# Altium schematic symbol library NTS_Integrated_IC.SchLib: 8 symbols
Pins are listed as number, name and electrical type; pins without a type are passive.

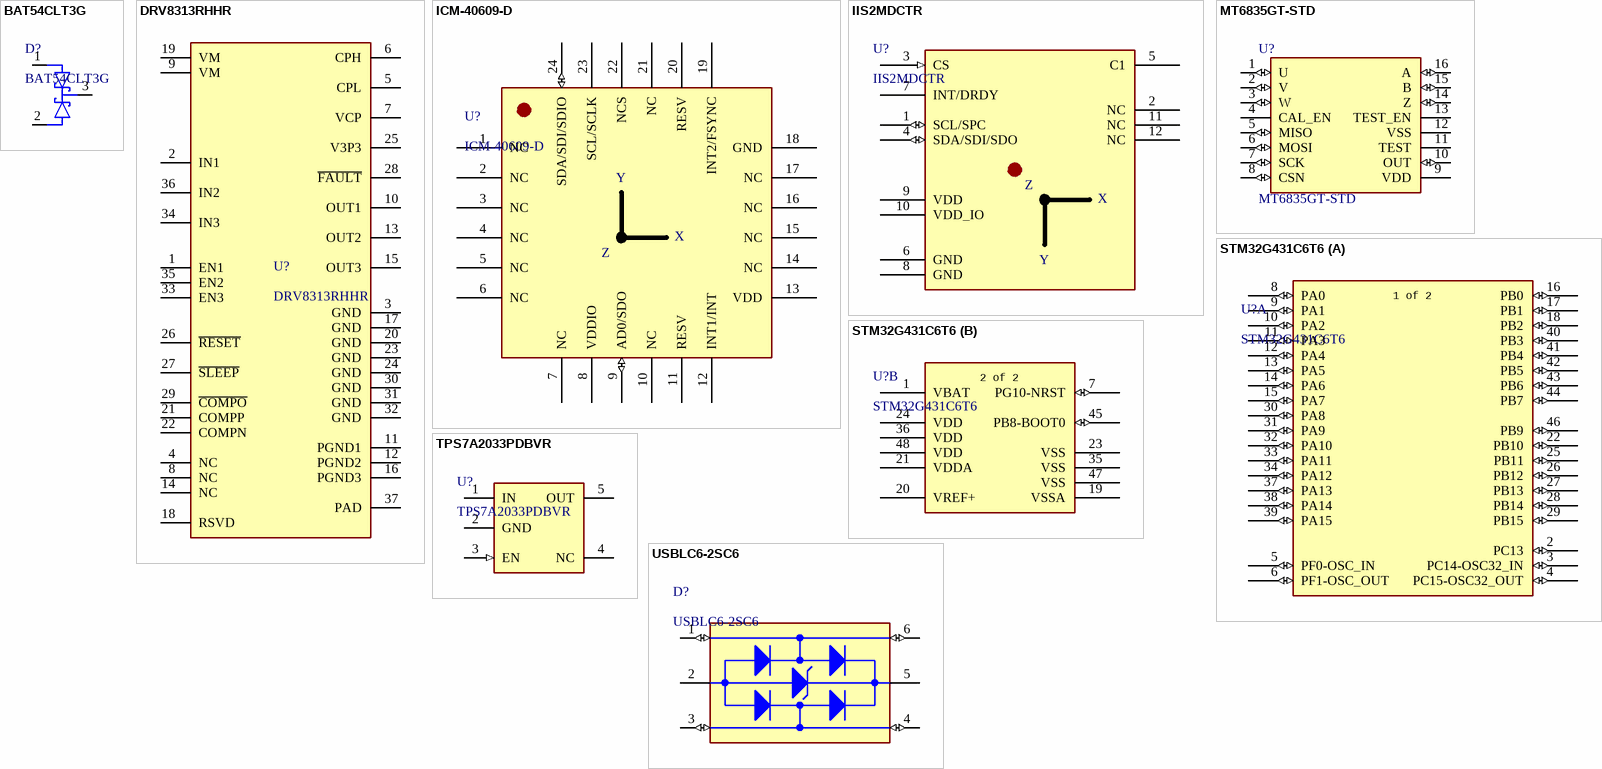
[diagram p0: symbols BAT54CLT3G to USBLC6-2SC6]

## BAT54CLT3G
designator D?
BAT54CL Series 30 V 2 uA Surface Mount Schottky Barrier Diode - SOT-23; Manufacturer: onsemi; Manufacturer Lifecycle Status: ACTIVE; Average Rectified Current: 200mA; Element Configuration: Common Cathode; Forward Voltage: 240mV; Max Forward Surge Current (Ifsm): 600mA; Max Output Current: 100mA; Max Power Dissipation: 225mW; Max Repetitive Reverse Voltage (Vrrm): 30V; Max Reverse Leakage Current: 2µA; Number of Elements: 2; Recovery Time: 5ns; Supplier 1: DigiKey; Manufacturer Part Number: BAT54CLT3G; RoHS: Compliant; Category: Schottky Diodes; Stock 1: 167313; Pricing 1: 1=0.13, 10=0.081, 100=0.0499, 500=0.036, 1000=0.03147, 2000=0.02764, 5000=0.02347 (USD); Case/Package: SOT-23-3; China RoHS: Compliant; Contact Plating: Tin; Forward Current: 200mA; Halogen Free: Halogen Free; Height: 1.01mm; Lead Free: Lead Free; Length: 3.04mm; Lifecycle Status: Production; Max Operating Temperature: 125°C; Max Reverse Voltage (DC): 30V; Max Surge Current: 600mA; Min Operating Temperature: -55°C; Number of Pins: 3; Number of Terminals: 3; Packaging: Tape and Reel; Peak Non-Repetitive Surge Current: 600mA; Radiation Hardening: No; REACH SVHC: Yes; Reverse Recovery Time: 5ns; Schedule B: 8541100070, 8541100070|8541100070|8541100070|8541100070|8541100070; Width: 1.4mm; ComponentLink1URL: https://datasheet.octopart.com:443/BAT54CLT3G-onsemi-datasheet-175423440.pdf?src-supplier=IHS; ComponentLink1Description: https://datasheet.octopart.com:443/BAT54CLT3G-onsemi-datasheet-175423440.pdf?src-supplier=IHS; ComponentLink2URL: https://datasheet.octopart.com:443/BAT54CLT3G-ON-Semiconductor-datasheet-78758876.pdf?src-supplier=JRH+Electronics; ComponentLink2Description: https://datasheet.octopart.com:443/BAT54CLT3G-ON-Semiconductor-datasheet-78758876.pdf?src-supplier=JRH+Electronics; ComponentLink3URL: https://datasheet.octopart.com:443/BAT54CLT3G-ON-Semiconductor-datasheet-141916634.pdf?src-supplier=Upverter; ComponentLink3Description: https://datasheet.octopart.com:443/BAT54CLT3G-ON-Semiconductor-datasheet-141916634.pdf?src-supplier=Upverter; ComponentLink4URL: https://datasheet.octopart.com:443/BAT54CLT3G-ON-Semiconductor-datasheet-8332005.pdf?src-supplier=Future+Electronics; ComponentLink4Description: https://datasheet.octopart.com:443/BAT54CLT3G-ON-Semiconductor-datasheet-8332005.pdf?src-supplier=Future+Electronics; ComponentLink5URL: https://datasheet.octopart.com:443/BAT54CLT3G-ON-Semiconductor-datasheet-8106935.pdf?src-supplier=Future+Electronics; ComponentLink5Description: https://datasheet.octopart.com:443/BAT54CLT3G-ON-Semiconductor-datasheet-8106935.pdf?src-supplier=Future+Electronics; ComponentLink6URL: https://datasheet.octopart.com:443/BAT54CLT3G-ON-Semiconductor-datasheet-41525499.pdf?src-supplier=RS+(Formerly+Allied+Electronics); ComponentLink6Description: https://datasheet.octopart.com:443/BAT54CLT3G-ON-Semiconductor-datasheet-41525499.pdf?src-supplier=RS+(Formerly+Allied+Electronics); ComponentLink7URL: https://datasheet.octopart.com:443/BAT54CLT3G-onsemi-datasheet-189128037.pdf?src-supplier=Master+Electronics; ComponentLink7Description: https://datasheet.octopart.com:443/BAT54CLT3G-onsemi-datasheet-189128037.pdf?src-supplier=Master+Electronics; ComponentLink8URL: https://datasheet.octopart.com:443/BAT54CLT3G-ON-Semiconductor-datasheet-11629545.pdf?src-supplier=Arrow+Electronics; ComponentLink8Description: https://datasheet.octopart.com:443/BAT54CLT3G-ON-Semiconductor-datasheet-11629545.pdf?src-supplier=Arrow+Electronics; ComponentLink9URL: http://sigma.octopart.com:80/15540786/rohs_certificate/ON-Semiconductor-BAT54CLT3G.pdf?src-supplier=Compliance+Statements; ComponentLink9Description: http://sigma.octopart.com:80/15540786/rohs_certificate/ON-Semiconductor-BAT54CLT3G.pdf?src-supplier=Compliance+Statements; ComponentLink10URL: http://sigma.octopart.com:80/15674214/materials_sheet/ON-Semiconductor-BAT54CLT3G.csv?src-supplier=Compliance+Statements; ComponentLink10Description: http://sigma.octopart.com:80/15674214/materials_sheet/ON-Semiconductor-BAT54CLT3G.csv?src-supplier=Compliance+Statements; ComponentLink11URL: http://sigma.octopart.com:80/150604010/rohs_statement/ON-Semiconductor-BAT54CLT3G.pdf?src-supplier=Compliance+Statements; ComponentLink11Description: http://sigma.octopart.com:80/150604010/rohs_statement/ON-Semiconductor-BAT54CLT3G.pdf?src-supplier=Compliance+Statements; ComponentLink12URL: http://sigma.octopart.com:80/reach_statement/ON-Semiconductor-company-79.pdf?src-supplier=Compliance+Statements; ComponentLink12Description: http://sigma.octopart.com:80/reach_statement/ON-Semiconductor-company-79.pdf?src-supplier=Compliance+Statements; ComponentLink13URL: https://octopart.com:443/opatz8j6/c1?t=fWwoKikT5261mXGM0ypy0g0IGQzQcDddsSZuvbSVdmB-1nZSRZ4ggwUKqIc0QYATxiN1QNv3tc5K9gNLWSsypfRmlmmLl0CvTb6IWTPcR-jy4ZtU7iJlv7LHrjajWQE2jihf16JKVcuOV1nA2-N-excMr1_B4nLS4kXG99ZhUnnRORXzXCD22yMfTlIHVWxdWHuIGrDRLRfDN_FEl5iESrFYiOS-fWRa5LxuqDiveXSQWuYMoy0mSfHtN-TtcfG_yO7Nd7kaCwpBKZqOkFRn_ARKtZBKqK2rNXBFzcF_wkdg0CPJ3JBCCd0-fzEpMgisCGH-zXoAjZ7-YzxmcgmCGNIVYquym6vDa-BdygE&src-supplier=Compliance+Statements; ComponentLink13Description: https://octopart.com:443/opatz8j6/c1?t=fWwoKikT5261mXGM0ypy0g0IGQzQcDddsSZuvbSVdmB-1nZSRZ4ggwUKqIc0QYATxiN1QNv3tc5K9gNLWSsypfRmlmmLl0CvTb6IWTPcR-jy4ZtU7iJlv7LHrjajWQE2jihf16JKVcuOV1nA2-N-excMr1_B4nLS4kXG99ZhUnnRORXzXCD22yMfTlIHVWxdWHuIGrDRLRfDN_FEl5iESrFYiOS-fWRa5LxuqDiveXSQWuYMoy0mSfHtN-TtcfG_yO7Nd7kaCwpBKZqOkFRn_ARKtZBKqK2rNXBFzcF_wkdg0CPJ3JBCCd0-fzEpMgisCGH-zXoAjZ7-YzxmcgmCGNIVYquym6vDa-BdygE&src-supplier=Compliance+Statements; ComponentLink14URL: https://octopart.com:443/opatz8j6/c1?t=B_1W9NDPKiVW9_xeBhSjXW6qpRFQt1GubKuBeL6C7KMWiDqOWuxbkOIcp9dqtX3Yq8--5XW88lfGBVA7HmD66DFyQvDNcrrPjWXZiG4711EOeHHnHpPqwc95_S4fQme7yE9n3sYxdAQvxBXSm4yRVJ71c-OpzKpAJ6ywCVT0a0sKLuIcOVcaIgD61fZtF_LS1kcCDjRxNYrL9WJZcGi5NptJxef-JqYkGUKDfcFHMGi1KZqXCgPZbgxa-Fw5LZxpHp3-6aQwXylQzVvUqX6mobR1Vl3H8PpiMaQjr6OwzEQ9egeKJpLqUcsu08VRy-SY_uHfFQyy3GilZ_cbGYiHirfBU5Mi5EnID-Ym-OKf&src-supplier=Compliance+Statements; ComponentLink14Description: https://octopart.com:443/opatz8j6/c1?t=B_1W9NDPKiVW9_xeBhSjXW6qpRFQt1GubKuBeL6C7KMWiDqOWuxbkOIcp9dqtX3Yq8--5XW88lfGBVA7HmD66DFyQvDNcrrPjWXZiG4711EOeHHnHpPqwc95_S4fQme7yE9n3sYxdAQvxBXSm4yRVJ71c-OpzKpAJ6ywCVT0a0sKLuIcOVcaIgD61fZtF_LS1kcCDjRxNYrL9WJZcGi5NptJxef-JqYkGUKDfcFHMGi1KZqXCgPZbgxa-Fw5LZxpHp3-6aQwXylQzVvUqX6mobR1Vl3H8PpiMaQjr6OwzEQ9egeKJpLqUcsu08VRy-SY_uHfFQyy3GilZ_cbGYiHirfBU5Mi5EnID-Ym-OKf&src-supplier=Compliance+Statements; Supplier Part Number 1: BAT54CLT3GOSDKR-ND
footprint ONSC-SOT-23-3-318-08_V (SOT23, 3-Leads, Body 2.92x1.3mm, Pitch 0.95mm)
pins: 1 A1, 2 A2, 3 K

## DRV8313RHHR
designator U?
65-V max 3-A peak 3-phase motor driver with integrated FETs 36-VQFN -40 to 125; Manufacturer_Name: Texas Instruments; TYPE: TYPE; RefDes: RefDes; Copyright: Copyright (C) 2026 Ultra Librarian. All rights reserved.; Manufacturer_Part_Number: DRV8313RHHR
footprint QFN50P600X600X90-37N
pins: 1 EN1, 2 IN1, 3 GND, 4 NC, 5 CPL, 6 CPH, 7 VCP, 8 NC, 9 VM, 10 OUT1, 11 PGND1, 12 PGND2, 13 OUT2, 14 NC, 15 OUT3, 16 PGND3, 17 GND, 18 RSVD, 19 VM, 20 GND, 21 COMPP, 22 COMPN, 23 GND, 24 GND, 25 V3P3, 26 ~{RESET}, 27 ~{SLEEP}, 28 ~{FAULT}, 29 ~{COMPO}, 30 GND, 31 GND, 32 GND, 33 EN3, 34 IN3, 35 EN2, 36 IN2, 37 PAD

## ICM-40609-D
designator U?
IMU (Inertial Measurement Unit), 6-Axis, Accelerometer, Gyroscope; Manufacturer: TDK; Manufacturer Lifecycle Status: PRODUCTION; Supplier 1: DigiKey; Manufacturer Part Number: ICM-40609-D; RoHS: Compliant; Category: Sensors; Stock 1: 4348; Pricing 1: 5000=3.0875 (USD); Introduction Date: 2023-02-15; Length: 3mm; Lifecycle Status: Production; REACH SVHC: Yes; Width: 3mm; ComponentLink1URL: https://datasheet.octopart.com:443/ICM-40609-D-TDK-datasheet-168053012.pdf?src-supplier=TDK; ComponentLink1Description: https://datasheet.octopart.com:443/ICM-40609-D-TDK-datasheet-168053012.pdf?src-supplier=TDK; ComponentLink2URL: https://datasheet.octopart.com:443/ICM-40609-D-TDK-datasheet-178640640.pdf?src-supplier=Farnell; ComponentLink2Description: https://datasheet.octopart.com:443/ICM-40609-D-TDK-datasheet-178640640.pdf?src-supplier=Farnell; Supplier Part Number 1: 1428-ICM-40609-DTR-ND
footprint XDCR_ICM-40609-D
pins: 1 NC, 2 NC, 3 NC, 4 NC, 5 NC, 6 NC, 7 NC, 8 VDDIO (power), 9 AD0/SDO (io), 10 NC, 11 RESV, 12 INT1/INT, 13 VDD (power), 14 NC, 15 NC, 16 NC, 17 NC, 18 GND (power), 19 INT2/FSYNC, 20 RESV, 21 NC, 22 NCS, 23 SCL/SCLK, 24 SDA/SDI/SDIO (io)
text: Y; X; Z

## IIS2MDCTR
designator U?
IIS2MDC Series 3.6 V Ultra-Low-Power 3-axis Digital Magnetic Sensor - LGA-12; Manufacturer: STMicroelectronics; Manufacturer Package Identifier: LGA-12-DM00170568; Axis: X, Y, Z; Max Supply Voltage: 3.6V; Min Supply Voltage: 1.71V; Number of Circuits: 1; Operating Supply Voltage: 2.5V; Sensing Method: Magnetoresistive; Supplier 1: DigiKey; Manufacturer Part Number: IIS2MDCTR; RoHS: Compliant; Category: Hall Effect Sensors; Stock 1: 4818; Pricing 1: 1=3.25, 5=2.9, 10=2.77, 25=2.6136, 50=2.507, 100=2.4091, 500=2.21248, 1000=2.13927, 5000=1.99179 (USD); China RoHS: Compliant; Height: 700µm; Height - Seated (Max): 700µm; Length: 2mm; Lifecycle Status: Production; Max Operating Temperature: 85°C; Min Operating Temperature: -40°C; Number of Terminals: 12; Output Type: Digital; Packaging: Cut Tape; REACH SVHC: Yes; Schedule B: 8542390000, 8542390000|8542390000|8542390000|8542390000|8542390000; Temperature Grade: Industrial; Terminal Pitch: 500µm; Width: 2mm; ComponentLink1URL: https://datasheet.octopart.com:443/IIS2MDCTR-STMicroelectronics-datasheet-101965392.pdf?src-supplier=element14+APAC; ComponentLink1Description: https://datasheet.octopart.com:443/IIS2MDCTR-STMicroelectronics-datasheet-101965392.pdf?src-supplier=element14+APAC
footprint FP-LGA-12-DM00170568-MFG
pins: 1 SCL/SPC (io), 2 NC, 3 CS (in), 4 SDA/SDI/SDO (io), 5 C1, 6 GND (power), 7 INT/DRDY, 8 GND (power), 9 VDD (power), 10 VDD_IO (power), 11 NC, 12 NC
text: Z; X; Y

## MT6835GT-STD
designator U?
SPI TSSOP-16 Angle, Linear Position Measuring RoHS; Manufacturer: Magn Tek; Current - Supply: 22mA; Voltage - Supply: 3V~5.5V; Manufacturer Part Number: MT6835GT-STD; Category: Sensors; Package: TSSOP-16; Operating Temperature: -40℃~+125℃; Features: Angle nonlinearity compensation;Self-calibration;Zero position programming;Fault diagnosis; Interface: SPI; Supplier 1: LCSC; Supplier Part Number: C2932578
footprint MT6835GT-STD
pins: 1 U (io), 2 V (io), 3 W (io), 4 CAL_EN, 5 MISO (io), 6 MOSI (io), 7 SCK (io), 8 CSN (io), 9 VDD (power), 10 OUT (io), 11 TEST, 12 VSS, 13 TEST_EN, 14 Z (io), 15 B (io), 16 A (io)

## STM32G431C6T6
designator U?
Microcontroller 32-Bit ARM Cortex-M4 RISC 32K-Byte Flash 3.3V 48-Pin LQFP; Manufacturer: STMicroelectronics; ADC Channels (Resolution): 17-Ch 12-Bit; DAC Channels (Resolution): 4-Ch 12-Bit; EEPROM Memory Size: 0B; Flash Memory Size: 32kB; Frequency: 170MHz; Interface: USB; Max Frequency: 48MHz; Max Supply Current: 29mA; Max Supply Voltage: 3.6V; Min Supply Voltage: 1.71V; Nominal Supply Voltage (DC): 3V; Number of A/D Converters: 2; Number of Channels: 17; Number of I2C Channels: 3; Number of I/Os: 5; Number of Interrupts: 16; Number of Timers/Counters: 12; Peripherals: POR; Supplier 1: Future Electronics; Manufacturer Part Number: STM32G431C6T6; RoHS: Compliant; Category: Microcontrollers; Stock 1: 1500; Pricing 1: 1500=2.29 (USD); Case/Package: LFQFP; China RoHS: Compliant; Core Architecture: ARM Cortex-M4; Country of Origin: Mainland China, Taiwan; Export Control Classification Number (ECCN) Code: 3A991.A.2; Height - Seated (Max): 1.6mm; Harmonized Tariff Schedule (HTS) Code: 8542.31.00.25; Introduction Date: 2019-10-29; Length: 7mm; Lifecycle Status: Production; Max Operating Temperature: 85°C; Memory Type: FLASH; Min Operating Temperature: -40°C; Number of D/A Converters: 2; Number of SPI Channels: 3; Number of Terminals: 48; Number of USART Channels: 3; RAM Size: 32kB; REACH SVHC: Yes; Schedule B: 8542310000, 8542310000|8542310000|8542310000|8542310000|8542310000; Terminal Pitch: 500µm; Width: 7mm; ComponentLink1URL: https://datasheet.octopart.com:443/STM32G431C6T6-STMicroelectronics-datasheet-159144895.pdf?src-supplier=Newark; ComponentLink1Description: https://datasheet.octopart.com:443/STM32G431C6T6-STMicroelectronics-datasheet-159144895.pdf?src-supplier=Newark; ComponentLink2URL: https://datasheet.octopart.com:443/STM32G431C6T6-STMicroelectronics-datasheet-144618855.pdf?src-supplier=TME; ComponentLink2Description: https://datasheet.octopart.com:443/STM32G431C6T6-STMicroelectronics-datasheet-144618855.pdf?src-supplier=TME; Supplier Part Number 1: STM32G431C6T6
footprint LQFP48-7x7mm
part A pins: 2 PC13 (io), 3 PC14-OSC32_IN (io), 4 PC15-OSC32_OUT (io), 5 PF0-OSC_IN (io), 6 PF1-OSC_OUT (io), 8 PA0 (io), 9 PA1 (io), 10 PA2 (io), 11 PA3 (io), 12 PA4 (io), 13 PA5 (io), 14 PA6 (io), 15 PA7 (io), 16 PB0 (io), 17 PB1 (io), 18 PB2 (io), 22 PB10 (io), 25 PB11 (io), 26 PB12 (io), 27 PB13 (io), 28 PB14 (io), 29 PB15 (io), 30 PA8 (io), 31 PA9 (io), 32 PA10 (io), 33 PA11 (io), 34 PA12 (io), 37 PA13 (io), 38 PA14 (io), 39 PA15 (io), 40 PB3 (io), 41 PB4 (io), 42 PB5 (io), 43 PB6 (io), 44 PB7 (io), 46 PB9 (io)
part B pins: 1 VBAT (power), 7 PG10-NRST (io), 19 VSSA (power), 20 VREF+ (power), 21 VDDA (power), 23 VSS (power), 24 VDD (power), 35 VSS (power), 36 VDD (power), 45 PB8-BOOT0 (io), 47 VSS (power), 48 VDD (power)
part A text: 1 of 2
part B text: 2 of 2

## TPS7A2033PDBVR
designator U?
300mA ultra-low-noise low-IQ low-dropout (LDO) linear regulator with high PSRR 5-SOT-23 -40 to 125; Manufacturer: Texas Instruments; Manufacturer Lifecycle Status: ACTIVE; Accuracy: 1.5%; Dropout Voltage: 145mV; Max Junction Temperature (Tj): 125°C; Max Supply Voltage: 6V; Min Supply Voltage: 1.6V; Nominal Supply Current: 6.5µA; Number of Channels: 1; Output Voltage: 3.3V; Supplier 1: DigiKey; Manufacturer Part Number: TPS7A2033PDBVR; RoHS: Compliant; Category: LDO Voltage Regulators; Stock 1: 57995; Pricing 1: 1=0.33, 10=0.225, 25=0.1992, 100=0.1715, 250=0.15828, 500=0.15028, 1000=0.14369 (USD); Case/Package: SOT-23-5; Height: 1.45mm; Length: 2.9mm; Lifecycle Status: Production; Max Operating Temperature: 125°C; Min Operating Temperature: -40°C; Number of Outputs: 1; Number of Pins: 5; Output Current: 300mA; Thickness: 1.2mm; Width: 1.6mm; ComponentLink1URL: https://sigma.octopart.com:443/177332311/technical_drawing/Texas-Instruments-TPS7A2033PDBVR.pdf?src-supplier=Texas+Instruments; ComponentLink1Description: https://sigma.octopart.com:443/177332311/technical_drawing/Texas-Instruments-TPS7A2033PDBVR.pdf?src-supplier=Texas+Instruments; ComponentLink2URL: https://octopart.com:443/opatz8j6/c1?t=jI4MJxUHNHWPLUTUjPFE_I4nFT9ogQQS70wFg6iEODFO8LbYHvqBDKPBMlDtEwO4fNGI88ubVwCkCjf0m79oYyvw0lNgXSr_kQlB_nshs-lDL0gpQEt062WpfwVbrY7aMcaNfk_VYcVu1c5ZyMHT8tYLznoJcMs0V3cIKOpV8FkTUbmZxBhaArT7MSQXB5rB175PQ9HeqkODOBcAb5uxQ4pXmdIRVFW0nHjT5bbTxbLCkHYQ6wSbjOTmjpzrmMdRq376bhW5SzS0L0ZYTijf2l1mplZ7KrrI9CUmQvcyMNcVPe6befGlNnr1fDH3Q5Ss6aSm6FD-UpaqOnEuIpR4XaVo6xK0ksEziWk1rzqOuekfSo_fNioOtoDqTgyhaxobMR58zb0N&src-supplier=Texas+Instruments; ComponentLink2Description: https://octopart.com:443/opatz8j6/c1?t=jI4MJxUHNHWPLUTUjPFE_I4nFT9ogQQS70wFg6iEODFO8LbYHvqBDKPBMlDtEwO4fNGI88ubVwCkCjf0m79oYyvw0lNgXSr_kQlB_nshs-lDL0gpQEt062WpfwVbrY7aMcaNfk_VYcVu1c5ZyMHT8tYLznoJcMs0V3cIKOpV8FkTUbmZxBhaArT7MSQXB5rB175PQ9HeqkODOBcAb5uxQ4pXmdIRVFW0nHjT5bbTxbLCkHYQ6wSbjOTmjpzrmMdRq376bhW5SzS0L0ZYTijf2l1mplZ7KrrI9CUmQvcyMNcVPe6befGlNnr1fDH3Q5Ss6aSm6FD-UpaqOnEuIpR4XaVo6xK0ksEziWk1rzqOuekfSo_fNioOtoDqTgyhaxobMR58zb0N&src-supplier=Texas+Instruments; ComponentLink3URL: https://sigma.octopart.com:443/175570406/technical_drawing/Texas-Instruments-TPS7A2033PDBVR.pdf?src-supplier=Texas+Instruments; ComponentLink3Description: https://sigma.octopart.com:443/175570406/technical_drawing/Texas-Instruments-TPS7A2033PDBVR.pdf?src-supplier=Texas+Instruments; ComponentLink4URL: https://sigma.octopart.com:443/169406034/technical_drawing/Texas-Instruments-TPS7A2033PDBVR.pdf?src-supplier=Texas+Instruments; ComponentLink4Description: https://sigma.octopart.com:443/169406034/technical_drawing/Texas-Instruments-TPS7A2033PDBVR.pdf?src-supplier=Texas+Instruments; ComponentLink5URL: https://sigma.octopart.com:443/155939316/technical_drawing/Texas-Instruments-TPS7A2033PDBVR.pdf?src-supplier=Texas+Instruments; ComponentLink5Description: https://sigma.octopart.com:443/155939316/technical_drawing/Texas-Instruments-TPS7A2033PDBVR.pdf?src-supplier=Texas+Instruments; ComponentLink6URL: https://datasheet.octopart.com:443/TPS7A2033PDBVR-Texas-Instruments-datasheet-149070019.pdf?src-supplier=Upverter; ComponentLink6Description: https://datasheet.octopart.com:443/TPS7A2033PDBVR-Texas-Instruments-datasheet-149070019.pdf?src-supplier=Upverter; ComponentLink7URL: https://datasheet.octopart.com:443/TPS7A2033PDBVR-Texas-Instruments-datasheet-164420832.pdf?src-supplier=Augswan; ComponentLink7Description: https://datasheet.octopart.com:443/TPS7A2033PDBVR-Texas-Instruments-datasheet-164420832.pdf?src-supplier=Augswan; ComponentLink8URL: https://datasheet.octopart.com:443/TPS7A2033PDBVR-Texas-Instruments-datasheet-159781690.pdf?src-supplier=LCSC; ComponentLink8Description: https://datasheet.octopart.com:443/TPS7A2033PDBVR-Texas-Instruments-datasheet-159781690.pdf?src-supplier=LCSC; ComponentLink9URL: http://sigma.octopart.com:80/reach_statement/Texas-Instruments-company-64.pdf?src-supplier=Compliance+Statements; ComponentLink9Description: http://sigma.octopart.com:80/reach_statement/Texas-Instruments-company-64.pdf?src-supplier=Compliance+Statements; ComponentLink10URL: http://sigma.octopart.com:80/conflict_mineral_statement/Texas-Instruments-company-63.pdf?src-supplier=Compliance+Statements; ComponentLink10Description: http://sigma.octopart.com:80/conflict_mineral_statement/Texas-Instruments-company-63.pdf?src-supplier=Compliance+Statements; Supplier Part Number 1: 296-TPS7A2033PDBVRDKR-ND
footprint FP-DBV0005A-MFG
pins: 1 IN (power), 2 GND (power), 3 EN (in), 4 NC, 5 OUT

## USBLC6-2SC6
designator D?
STMicroelectronics USBLC6-2SC6 TVS diode surge protection on full tape reel; Breakdown Voltage: 6V; Capacitance: 2.5pF; Clamping Voltage: 17V; Data Rate: 480Mbps; Direction: Unidirectional; Element Configuration: Dual; ESD Protection: Yes; Forward Voltage: 1.1V; Leakage Current: 150nA; Max Junction Temperature (Tj): 125°C; Max Repetitive Reverse Voltage (Vrrm): 5.25V; Number of Bidirectional Channels: 2; Number of Elements: 1; Peak Pulse Current: 5A; Reverse Standoff Voltage: 5V; Test Current: 1mA; Supplier 1: DigiKey; Manufacturer: STMicroelectronics; Manufacturer Part Number: USBLC6-2SC6; RoHS: Compliant; Category: TVS Diodes; Stock 1: 66064; Pricing 1: 1=0.36, 10=0.243, 100=0.163, 500=0.127, 1000=0.114 (USD); Case/Package: SOT-23; China RoHS: Compliant; Contact Plating: Tin; Depth: 1.75mm; Height: 1.45mm; Lead Free: Lead Free; Length: 3.05mm; Lifecycle Status: Production; Max Breakdown Voltage: 6V; Max Operating Temperature: 125°C; Max Reverse Leakage Current: 150nA; Min Breakdown Voltage: 6V; Min Operating Temperature: -40°C; Mount: Surface Mount; Number of Channels: 2; Number of Pins: 6; Number of Terminals: 6; Operating Supply Voltage: 1.1V; Peak Reverse Current: 150nA; Polarity: Unidirectional; Power Line Protection: Yes; Radiation Hardening: No; REACH SVHC: Yes; Reverse Breakdown Voltage: 6V; Schedule B: 8536300000, 8536300000|8536300000|8536300000|8536300000|8536300000|8536300000|8536300000|8536300000|8536300000|8536300000|8536300000|8536300000|8536300000|8536300000|8536300000|8536300000|8536300000|8536300000|8536300000|8536300000|8536300000|8536300000|8536300000|85; Termination: SMD/SMT; Width: 1.75mm; Working Voltage: 5V; ComponentLink1URL: https://datasheet.octopart.com:443/USBLC6-2SC6-STMicroelectronics-datasheet-10412581.pdf?src-supplier=Newark; ComponentLink1Description: https://datasheet.octopart.com:443/USBLC6-2SC6-STMicroelectronics-datasheet-10412581.pdf?src-supplier=Newark; ComponentLink2URL: https://datasheet.octopart.com:443/USBLC6-2SC6-STMicroelectronics-datasheet-181961833.pdf?src-supplier=Newark; ComponentLink2Description: https://datasheet.octopart.com:443/USBLC6-2SC6-STMicroelectronics-datasheet-181961833.pdf?src-supplier=Newark; ComponentLink3URL: https://datasheet.octopart.com:443/USBLC6-2SC6-STMicroelectronics-datasheet-525477.pdf?src-supplier=Factory+Futures; ComponentLink3Description: https://datasheet.octopart.com:443/USBLC6-2SC6-STMicroelectronics-datasheet-525477.pdf?src-supplier=Factory+Futures; ComponentLink4URL: https://datasheet.octopart.com:443/USBLC6-2SC6-STMicroelectronics-datasheet-82998616.pdf?src-supplier=Farnell; ComponentLink4Description: https://datasheet.octopart.com:443/USBLC6-2SC6-STMicroelectronics-datasheet-82998616.pdf?src-supplier=Farnell; ComponentLink5URL: https://datasheet.octopart.com:443/USBLC6-2SC6-STMicroelectronics-datasheet-46285.pdf?src-supplier=Farnell; ComponentLink5Description: https://datasheet.octopart.com:443/USBLC6-2SC6-STMicroelectronics-datasheet-46285.pdf?src-supplier=Farnell; ComponentLink6URL: https://datasheet.octopart.com:443/USBLC6-2SC6-STMicroelectronics-datasheet-14050643.pdf?src-supplier=iiiC; ComponentLink6Description: https://datasheet.octopart.com:443/USBLC6-2SC6-STMicroelectronics-datasheet-14050643.pdf?src-supplier=iiiC; ComponentLink7URL: https://datasheet.octopart.com:443/USBLC6-2SC6-STMicroelectronics-datasheet-10521292.pdf?src-supplier=Jameco; ComponentLink7Description: https://datasheet.octopart.com:443/USBLC6-2SC6-STMicroelectronics-datasheet-10521292.pdf?src-supplier=Jameco
footprint SOT95P280X145-6N
pins: 1 I/O1_IN (io), 2 GND (power), 3 I/O2_IN (io), 4 I/O2_OUT (io), 5 VBUS (power), 6 I/O1_OUT (io)